# Altium footprint library Package_BGA.PcbLib: 230 footprints (part 12 of 28)
Each footprint in its own frame and in the unit in brackets; x right, y up, seen from the top. Pads: shape width x height; smd on the part's side, far side on the other; paste and mask are expansions set on the pad; w line width, h text height; cw(c..) or ccw(c..) is an arc to the next point about the centre after c.
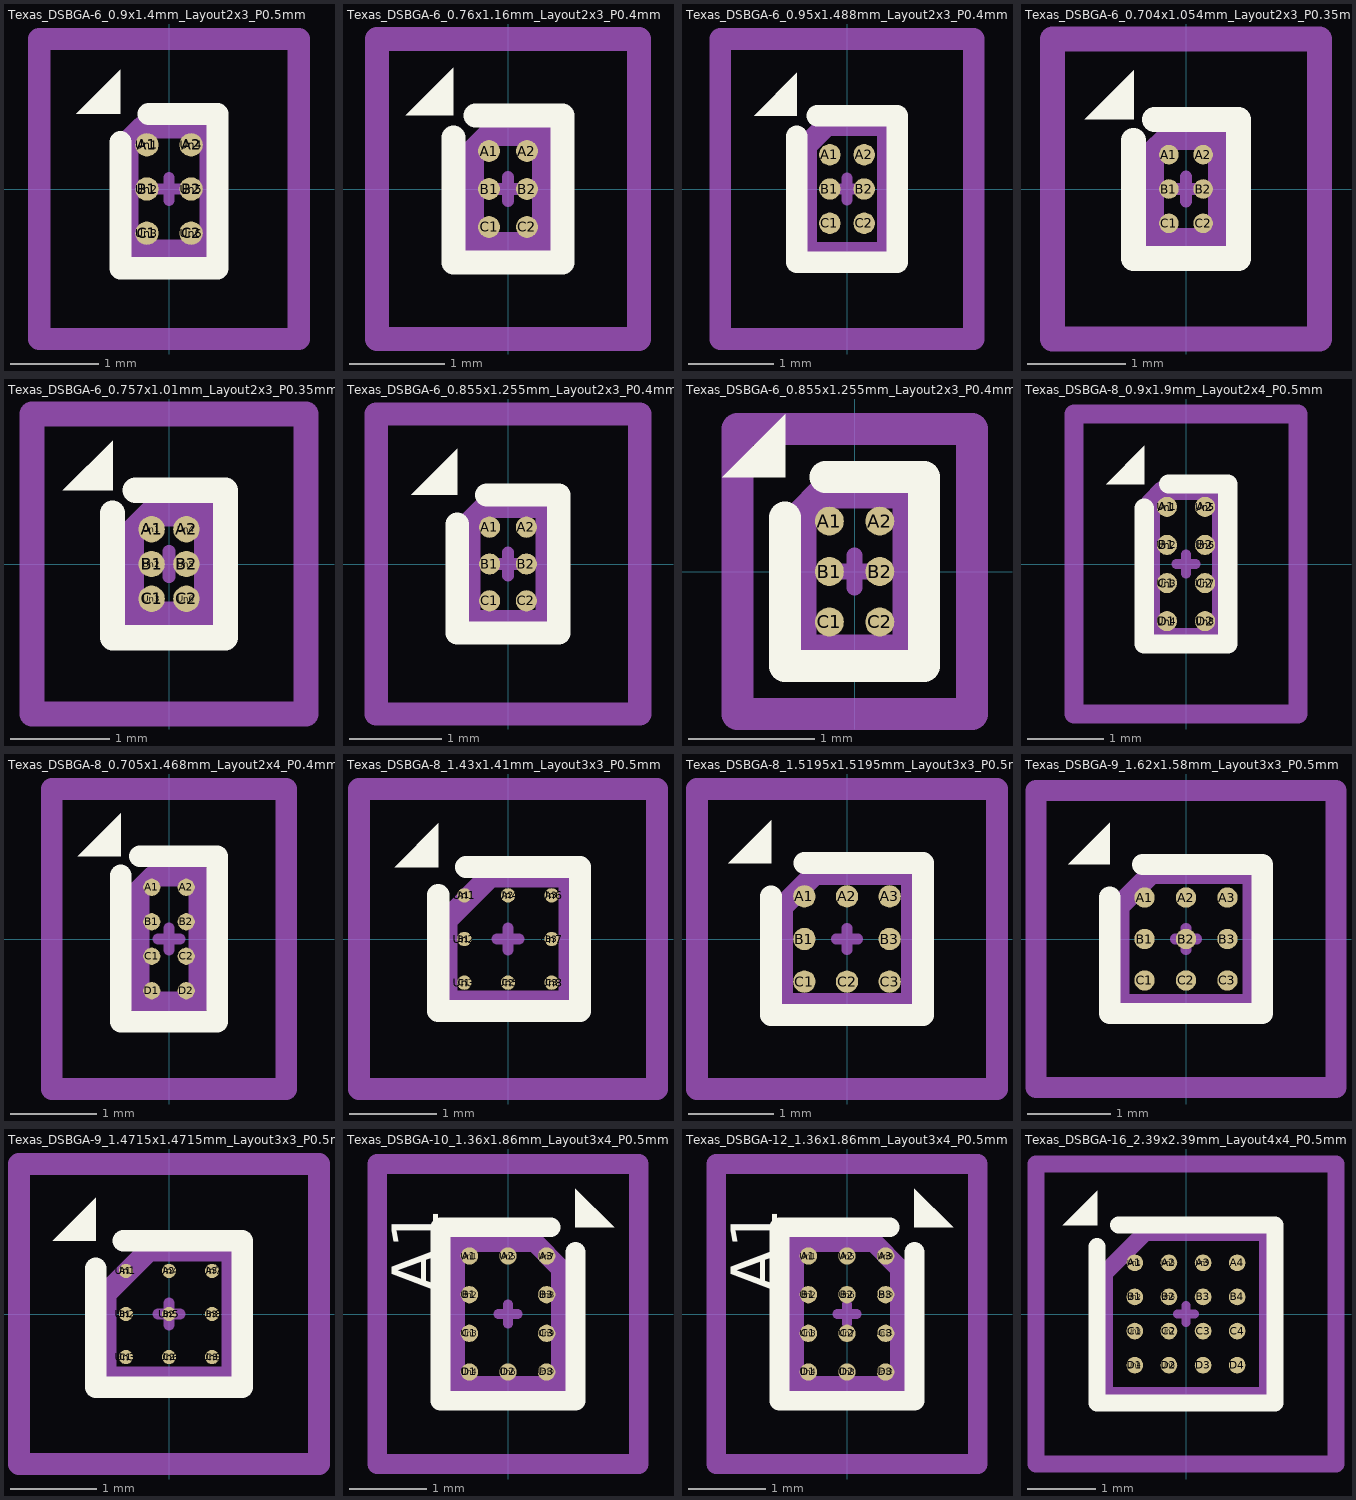
[diagram p11: the footprints below, top view; thin cyan lines are the x and y axes]

## Texas_DSBGA-6_0.9x1.4mm_Layout2x3_P0.5mm [mm] "Texas_DSBGA-6_0.9x1.4mm_Layout2x3_P0.5mm"
pads (12):
  round 0.265 smd: A1(-0.25,0.5) A2(0.25,0.5) B1(-0.25,0) B2(0.25,0) C1(-0.25,-0.5) C2(0.25,-0.5)
  rect 0.3x0.3 on Top Paste: Un1(-0.25,0.5) Un2(-0.25,0) Un3(-0.25,-0.5) Un4(0.25,0.5) Un5(0.25,0) Un6(0.25,-0.5)
F.SilkS:
  region: -0.55,0.85 -1.05,0.85 -0.55,1.35
  lines w0.254: -0.55,0.53 -0.55,-0.9 0.55,-0.9 0.55,0.85 -0.23,0.85
Top Component Center:
  lines w0.127: -0.127,0 0.127,0 -0.127,0 ; 0,-0.127 0,0.127 0,-0.127
Top Assembly:
  lines w0.254: -0.47,-0.7 -0.47,0.53 -0.3,0.7 0.47,0.7 0.47,-0.7 -0.47,-0.7
Top Courtyard:
  lines w0.254: -1.47,-1.7 -1.47,1.7 1.47,1.7 1.47,-1.7 -1.47,-1.7
Top Designator:
  text ".Designator" at -2.253,-0.226 h1

## Texas_DSBGA-6_0.76x1.16mm_Layout2x3_P0.4mm [mm] "Texas_DSBGA-6_0.76x1.16mm_Layout2x3_P0.4mm"
pads (6):
  round 0.23 smd: A1(-0.2,0.4) A2(0.2,0.4) B1(-0.2,0) B2(0.2,0) C1(-0.2,-0.4) C2(0.2,-0.4)
F.SilkS:
  region: -0.575,0.775 -1.075,0.775 -0.575,1.275
  lines w0.254: -0.575,0.543 -0.575,-0.775 0.575,-0.775 0.575,0.775 -0.343,0.775
Top Component Center:
  lines w0.127: -0.127,0 0.127,0 -0.127,0 ; 0,-0.127 0,0.127 0,-0.127
Top Assembly:
  lines w0.254: -0.38,-0.58 0.38,-0.58 0.38,0.58 -0.19,0.58 -0.38,0.39 -0.38,-0.58
Top Courtyard:
  lines w0.254: -1.38,-1.58 1.38,-1.58 1.38,1.58 -1.38,1.58 -1.38,-1.58
Top Designator:
  text ".Designator" at -2.253,-0.226 h1

## Texas_DSBGA-6_0.95x1.488mm_Layout2x3_P0.4mm [mm] "Texas_DSBGA-6_0.95x1.488mm_Layout2x3_P0.4mm"
pads (6):
  round 0.25 smd: A1(-0.2,0.4) A2(0.2,0.4) B1(-0.2,0) B2(0.2,0) C1(-0.2,-0.4) C2(0.2,-0.4)
F.SilkS:
  region: -0.585,0.854 -1.085,0.854 -0.585,1.354
  lines w0.254: -0.585,0.617 -0.585,-0.854 0.585,-0.854 0.585,0.854 -0.347,0.854
Top Component Center:
  lines w0.127: -0.127,0 0.127,0 -0.127,0 ; 0,-0.127 0,0.127 0,-0.127
Top Assembly:
  lines w0.254: -0.475,-0.744 -0.475,0.506 -0.238,0.744 0.475,0.744 0.475,-0.744 -0.475,-0.744
Top Courtyard:
  lines w0.254: -1.48,-1.75 -1.48,1.75 1.48,1.75 1.48,-1.75 -1.48,-1.75
Top Designator:
  text ".Designator" at -2.253,-0.226 h1

## Texas_DSBGA-6_0.704x1.054mm_Layout2x3_P0.35mm [mm] "Texas_DSBGA-6_0.704x1.054mm_Layout2x3_P0.35mm"
pads (6):
  round 0.2 smd: A1(-0.175,0.35) A2(0.175,0.35) B1(-0.175,0) B2(0.175,0) C1(-0.175,-0.35) C2(0.175,-0.35)
F.SilkS:
  region: -0.535,0.71 -1.035,0.71 -0.535,1.21
  lines w0.254: -0.535,0.497 -0.535,-0.71 0.535,-0.71 0.535,0.71 -0.323,0.71
Top Component Center:
  lines w0.127: -0.127,0 0.127,0 -0.127,0 ; 0,-0.127 0,0.127 0,-0.127
Top Assembly:
  lines w0.254: -0.352,-0.527 0.352,-0.527 0.352,0.527 -0.176,0.527 -0.352,0.351 -0.352,-0.527
Top Courtyard:
  lines w0.254: -1.36,-1.53 1.36,-1.53 1.36,1.53 -1.36,1.53 -1.36,-1.53
Top Designator:
  text ".Designator" at -2.253,-0.226 h1

## Texas_DSBGA-6_0.757x1.01mm_Layout2x3_P0.35mm [mm] "Texas_DSBGA-6_0.757x1.01mm_Layout2x3_P0.35mm"
pads (12):
  round 0.265 smd: A1(-0.175,0.35) A2(0.175,0.35) B1(-0.175,0) B2(0.175,0) C1(-0.175,-0.35) C2(0.175,-0.35)
  rrect18% 0.21x0.21 on Top Paste: Un1(-0.175,0.35) Un2(-0.175,0) Un3(-0.175,-0.35) Un4(0.175,0.35) Un5(0.175,0) Un6(0.175,-0.35)
F.SilkS:
  region: -0.567,0.743 -1.068,0.743 -0.567,1.242
  lines w0.254: -0.567,0.514 -0.567,-0.743 0.567,-0.743 0.567,0.743 -0.339,0.743
Top Component Center:
  lines w0.127: -0.127,0 0.127,0 -0.127,0 ; 0,-0.127 0,0.127 0,-0.127
Top Assembly:
  lines w0.254: -0.379,-0.505 -0.379,0.316 -0.189,0.505 0.379,0.505 0.379,-0.505 -0.379,-0.505
Top Courtyard:
  lines w0.254: -1.38,-1.51 -1.38,1.51 1.38,1.51 1.38,-1.51 -1.38,-1.51
Top Designator:
  text ".Designator" at -2.253,-0.226 h1
3D body "Texas_DSBGA-6_0.757x1.01mm_Layout2x3_P0.35mm.step": height 0.38, standoff -0.01, extent -0.379,-0.505 0.379,0.505
3D body "Texas_DSBGA-6_0.757x1.01mm_Layout2x3_P0.35mm.step": height 0.38, standoff -0.01, extent -0.379,-0.505 0.379,0.505

## Texas_DSBGA-6_0.855x1.255mm_Layout2x3_P0.4mm_LevelB [mm] "Texas_DSBGA-6_0.855x1.255mm_Layout2x3_P0.4mm_LevelB"
pads (6):
  round 0.23 smd: A1(-0.2,0.4) A2(0.2,0.4) B1(-0.2,0) B2(0.2,0) C1(-0.2,-0.4) C2(0.2,-0.4)
F.SilkS:
  region: -0.55,0.75 -1.05,0.75 -0.55,1.25
  lines w0.254: -0.55,0.43 -0.55,-0.75 0.55,-0.75 0.55,0.75 -0.23,0.75
F.Paste:
  lines w0.254: -0.275,-0.475 -0.125,-0.475 -0.125,-0.325 -0.275,-0.325 -0.275,-0.475 ; -0.275,-0.075 -0.125,-0.075 -0.125,0.075 -0.275,0.075 -0.275,-0.075 ; -0.275,0.325 -0.125,0.325 -0.125,0.475 -0.275,0.475 -0.275,0.325 ; 0.125,-0.475 0.275,-0.475 0.275,-0.325 0.125,-0.325 0.125,-0.475 ; 0.125,-0.075 0.275,-0.075 0.275,0.075 0.125,0.075 0.125,-0.075 ; 0.125,0.325 0.275,0.325 0.275,0.475 0.125,0.475 0.125,0.325
Top Component Center:
  lines w0.127: -0.127,0 0.127,0 -0.127,0 ; 0,-0.127 0,0.127 0,-0.127
Top Assembly:
  lines w0.254: -0.427,-0.627 0.427,-0.627 0.427,0.627 -0.238,0.627 -0.427,0.437 -0.427,-0.627
Top Courtyard:
  lines w0.254: -1.43,-1.63 1.43,-1.63 1.43,1.63 -1.43,1.63 -1.43,-1.63
Top Designator:
  text ".Designator" at -2.253,-0.226 h1

## Texas_DSBGA-6_0.855x1.255mm_Layout2x3_P0.4mm_LevelC [mm] "Texas_DSBGA-6_0.855x1.255mm_Layout2x3_P0.4mm_LevelC"
pads (6):
  round 0.23 smd: A1(-0.2,0.4) A2(0.2,0.4) B1(-0.2,0) B2(0.2,0) C1(-0.2,-0.4) C2(0.2,-0.4)
F.SilkS:
  region: -0.55,0.75 -1.05,0.75 -0.55,1.25
  lines w0.254: -0.55,0.43 -0.55,-0.75 0.55,-0.75 0.55,0.75 -0.23,0.75
F.Paste:
  lines w0.254: -0.275,-0.475 -0.125,-0.475 -0.125,-0.325 -0.275,-0.325 -0.275,-0.475 ; -0.275,-0.075 -0.125,-0.075 -0.125,0.075 -0.275,0.075 -0.275,-0.075 ; -0.275,0.325 -0.125,0.325 -0.125,0.475 -0.275,0.475 -0.275,0.325 ; 0.125,-0.475 0.275,-0.475 0.275,-0.325 0.125,-0.325 0.125,-0.475 ; 0.125,-0.075 0.275,-0.075 0.275,0.075 0.125,0.075 0.125,-0.075 ; 0.125,0.325 0.275,0.325 0.275,0.475 0.125,0.475 0.125,0.325
Top Component Center:
  lines w0.127: -0.127,0 0.127,0 -0.127,0 ; 0,-0.127 0,0.127 0,-0.127
Top Assembly:
  lines w0.254: -0.427,-0.627 0.427,-0.627 0.427,0.627 -0.238,0.627 -0.427,0.437 -0.427,-0.627
Top Courtyard:
  lines w0.254: -0.93,-1.13 0.93,-1.13 0.93,1.13 -0.93,1.13 -0.93,-1.13
Top Designator:
  text ".Designator" at -1.69,-0.171 h0.75

## Texas_DSBGA-8_0.9x1.9mm_Layout2x4_P0.5mm [mm] "Texas_DSBGA-8_0.9x1.9mm_Layout2x4_P0.5mm"
pads (16):
  round 0.265 smd: A1(-0.25,0.75) A2(0.25,0.75) B1(-0.25,0.25) B2(0.25,0.25) C1(-0.25,-0.25) C2(0.25,-0.25) D1(-0.25,-0.75) D2(0.25,-0.75)
  rect 0.3x0.3 on Top Paste: Un1(-0.25,0.75) Un2(-0.25,0.25) Un3(-0.25,-0.25) Un4(-0.25,-0.75) Un5(0.25,0.75) Un6(0.25,0.25) Un7(0.25,-0.25) Un8(0.25,-0.75)
F.SilkS:
  region: -0.55,1.05 -1.05,1.05 -0.55,1.55
  lines w0.254: -0.55,0.73 -0.55,-1.05 0.55,-1.05 0.55,1.05 -0.23,1.05
Top Component Center:
  lines w0.127: -0.127,0 0.127,0 -0.127,0 ; 0,-0.127 0,0.127 0,-0.127
Top Assembly:
  lines w0.254: -0.47,-0.97 -0.47,0.8 -0.3,0.97 0.47,0.97 0.47,-0.97 -0.47,-0.97
Top Courtyard:
  lines w0.254: -1.47,-1.97 -1.47,1.97 1.47,1.97 1.47,-1.97 -1.47,-1.97
Top Designator:
  text ".Designator" at -2.253,-0.226 h1
3D body "Texas_DSBGA-8_0.9x1.9mm_Layout2x4_P0.5mm.step": height 0.5, standoff -0.01, extent -0.45,-0.95 0.45,0.95
3D body "Texas_DSBGA-8_0.9x1.9mm_Layout2x4_P0.5mm.step": height 0.5, standoff -0.01, extent -0.45,-0.95 0.45,0.95

## Texas_DSBGA-8_0.705x1.468mm_Layout2x4_P0.4mm [mm] "Texas_DSBGA-8_0.705x1.468mm_Layout2x4_P0.4mm"
pads (8):
  round 0.2 smd: A1(-0.2,0.6) A2(0.2,0.6) B1(-0.2,0.2) B2(0.2,0.2) C1(-0.2,-0.2) C2(0.2,-0.2) D1(-0.2,-0.6) D2(0.2,-0.6)
F.SilkS:
  region: -0.56,0.96 -1.06,0.96 -0.56,1.46
  lines w0.254: -0.56,0.735 -0.56,-0.96 0.56,-0.96 0.56,0.96 -0.335,0.96
Top Component Center:
  lines w0.127: -0.127,0 0.127,0 -0.127,0 ; 0,-0.127 0,0.127 0,-0.127
Top Assembly:
  lines w0.254: -0.353,-0.734 -0.353,0.558 -0.176,0.734 0.353,0.734 0.353,-0.734 -0.353,-0.734
Top Courtyard:
  lines w0.254: -1.36,-1.74 -1.36,1.74 1.36,1.74 1.36,-1.74 -1.36,-1.74
Top Designator:
  text ".Designator" at -2.253,-0.226 h1
3D body "Texas_DSBGA-8_0.705x1.468mm_Layout2x4_P0.4mm.step": height 0.38, standoff -0.03, extent -0.353,-0.734 0.353,0.734
3D body "Texas_DSBGA-8_0.705x1.468mm_Layout2x4_P0.4mm.step": height 0.38, standoff -0.03, extent -0.353,-0.734 0.353,0.734

## Texas_DSBGA-8_1.43x1.41mm_Layout3x3_P0.5mm [mm] "Texas_DSBGA-8_1.43x1.41mm_Layout3x3_P0.5mm"
pads (16):
  round 0.165 smd: A1(-0.5,0.5) A2(0,0.5) A3(0.5,0.5) B1(-0.5,0) B3(0.5,0) C1(-0.5,-0.5) C2(0,-0.5) C3(0.5,-0.5)
  rect 0.3x0.3 on Top Paste: Un1(-0.5,0.5) Un2(-0.5,0) Un3(-0.5,-0.5) Un4(0,0.5) Un5(0,-0.5) Un6(0.5,0.5) Un7(0.5,0) Un8(0.5,-0.5)
F.SilkS:
  region: -0.8,0.825 -1.3,0.825 -0.8,1.325
  lines w0.254: -0.8,-0.825 0.815,-0.825 ; -0.8,-0.8 -0.8,0.505 ; -0.48,0.825 0.815,0.825 ; 0.825,-0.825 0.825,0.825
Top Component Center:
  lines w0.127: -0.127,0 0.127,0 -0.127,0 ; 0,-0.127 0,0.127 0,-0.127
Top Assembly:
  lines w0.254: -0.705,-0.715 0.705,-0.715 0.705,0.715 -0.205,0.715 -0.705,0.215 -0.705,-0.715
Top Courtyard:
  lines w0.254: -1.71,-1.72 1.71,-1.72 1.71,1.72 -1.71,1.72 -1.71,-1.72
Top Designator:
  text ".Designator" at -2.253,-0.226 h1

## Texas_DSBGA-8_1.5195x1.5195mm_Layout3x3_P0.5mm [mm] "Texas_DSBGA-8_1.5195x1.5195mm_Layout3x3_P0.5mm"
pads (8):
  round 0.262 smd: A1(-0.5,0.5) A2(0,0.5) A3(0.5,0.5) B1(-0.5,0) B3(0.5,0) C1(-0.5,-0.5) C2(0,-0.5) C3(0.5,-0.5)
F.SilkS:
  region: -0.891,0.891 -1.391,0.891 -0.891,1.391
  lines w0.254: -0.891,0.501 -0.891,-0.891 0.891,-0.891 0.891,0.891 -0.501,0.891
Top Component Center:
  lines w0.127: -0.127,0 0.127,0 -0.127,0 ; 0,-0.127 0,0.127 0,-0.127
Top Assembly:
  lines w0.254: -0.76,-0.76 -0.76,0.38 -0.38,0.76 0.76,0.76 0.76,-0.76 -0.76,-0.76
Top Courtyard:
  lines w0.254: -1.76,-1.76 -1.76,1.76 1.76,1.76 1.76,-1.76 -1.76,-1.76
Top Designator:
  text ".Designator" at -3.432,-0.345 h1.52

## Texas_DSBGA-9_1.62x1.58mm_Layout3x3_P0.5mm [mm] "Texas_DSBGA-9_1.62x1.58mm_Layout3x3_P0.5mm"
pads (9):
  round 0.245 smd: A1(-0.5,0.5) A2(0,0.5) A3(0.5,0.5) B1(-0.5,0) B2(0,0) B3(0.5,0) C1(-0.5,-0.5) C2(0,-0.5) C3(0.5,-0.5)
F.SilkS:
  region: -0.92,0.9 -1.42,0.9 -0.92,1.4
  lines w0.254: -0.92,0.505 -0.92,-0.9 0.92,-0.9 0.92,0.9 -0.525,0.9
Top Component Center:
  lines w0.127: -0.127,0 0.127,0 -0.127,0 ; 0,-0.127 0,0.127 0,-0.127
Top Assembly:
  lines w0.254: -0.81,-0.79 0.81,-0.79 0.81,0.79 -0.415,0.79 -0.81,0.395 -0.81,-0.79
Top Courtyard:
  lines w0.254: -1.81,-1.79 1.81,-1.79 1.81,1.79 -1.81,1.79 -1.81,-1.79
Top Designator:
  text ".Designator" at -2.253,-0.226 h1

## Texas_DSBGA-9_1.4715x1.4715mm_Layout3x3_P0.5mm [mm] "Texas_DSBGA-9_1.4715x1.4715mm_Layout3x3_P0.5mm"
pads (18):
  round 0.165 smd: A1(-0.5,0.5) A2(0,0.5) A3(0.5,0.5) B1(-0.5,0) B2(0,0) B3(0.5,0) C1(-0.5,-0.5) C2(0,-0.5) C3(0.5,-0.5)
  rect 0.3x0.3 on Top Paste: Un1(-0.5,0.5) Un2(-0.5,0) Un3(-0.5,-0.5) Un4(0,0.5) Un5(0,0) Un6(0,-0.5) Un7(0.5,0.5) Un8(0.5,0) Un9(0.5,-0.5)
F.SilkS:
  region: -0.85,0.85 -1.35,0.85 -0.85,1.35
  lines w0.254: -0.85,0.53 -0.85,-0.85 0.85,-0.85 0.85,0.85 -0.53,0.85
Top Component Center:
  lines w0.127: -0.127,0 0.127,0 -0.127,0 ; 0,-0.127 0,0.127 0,-0.127
Top Assembly:
  lines w0.254: -0.736,-0.736 -0.736,0.236 -0.236,0.736 0.736,0.736 0.736,-0.736 -0.736,-0.736
Top Courtyard:
  lines w0.254: -1.74,-1.74 -1.74,1.74 1.74,1.74 1.74,-1.74 -1.74,-1.74
Top Designator:
  text ".Designator" at -2.253,-0.226 h1

## Texas_DSBGA-10_1.36x1.86mm_Layout3x4_P0.5mm [mm] "v"
pads (20):
  round 0.225 smd: A1(-0.5,0.75) A2(0,0.75) A3(0.5,0.75) B1(-0.5,0.25) B3(0.5,0.25) C1(-0.5,-0.25) C3(0.5,-0.25) D1(-0.5,-0.75) D2(0,-0.75) D3(0.5,-0.75)
  rrect20% 0.25x0.25 on Top Paste: Un1(-0.5,0.75) Un2(-0.5,0.25) Un3(-0.5,-0.25) Un4(-0.5,-0.75) Un5(0,0.75) Un6(0,-0.75) Un7(0.5,0.75) Un8(0.5,0.25) Un9(0.5,-0.25) Un10(0.5,-0.75)
F.SilkS:
  region: 1.372,1.122 0.873,1.122 0.873,1.623
  lines w0.254: 0.553,1.122 -0.873,1.122 -0.873,-1.122 0.873,-1.122 0.873,0.803
  text "A1" at -0.9,0.28 h0.6
Top Component Center:
  lines w0.127: -0.127,0 0.127,0 -0.127,0 ; 0,-0.127 0,0.127 0,-0.127
Top Assembly:
  lines w0.254: -0.68,-0.93 -0.68,0.93 0.34,0.93 0.68,0.59 0.68,-0.93 -0.68,-0.93
Top Courtyard:
  lines w0.254: -1.69,-1.94 -1.69,1.94 1.69,1.94 1.69,-1.94 -1.69,-1.94
Top Designator:
  text ".Designator" at -2.253,-0.226 h1
3D body "Texas_DSBGA-10_1.36x1.86mm_Layout3x4_P0.5mm.step": height 0.63, standoff -0.01, extent -0.68,-0.93 0.68,0.93
3D body "Texas_DSBGA-10_1.36x1.86mm_Layout3x4_P0.5mm.step": height 0.63, standoff -0.01, extent -0.68,-0.93 0.68,0.93

## Texas_DSBGA-12_1.36x1.86mm_Layout3x4_P0.5mm [mm] "Texas_DSBGA-12_1.36x1.86mm_Layout3x4_P0.5mm"
pads (24):
  round 0.225 smd: A1(-0.5,0.75) A2(0,0.75) A3(0.5,0.75) B1(-0.5,0.25) B2(0,0.25) B3(0.5,0.25) C1(-0.5,-0.25) C2(0,-0.25) C3(0.5,-0.25) D1(-0.5,-0.75) D2(0,-0.75) D3(0.5,-0.75)
  rrect20% 0.25x0.25 on Top Paste: Un1(-0.5,0.75) Un2(-0.5,0.25) Un3(-0.5,-0.25) Un4(-0.5,-0.75) Un5(0,0.75) Un6(0,0.25) Un7(0,-0.25) Un8(0,-0.75) Un9(0.5,0.75) Un10(0.5,0.25) Un11(0.5,-0.25) Un12(0.5,-0.75)
F.SilkS:
  region: 1.372,1.122 0.873,1.122 0.873,1.623
  lines w0.254: 0.553,1.122 -0.873,1.122 -0.873,-1.122 0.873,-1.122 0.873,0.803
  text "A1" at -0.9,0.28 h0.6
Top Component Center:
  lines w0.127: -0.127,0 0.127,0 -0.127,0 ; 0,-0.127 0,0.127 0,-0.127
Top Assembly:
  lines w0.254: -0.68,-0.93 -0.68,0.93 0.34,0.93 0.68,0.59 0.68,-0.93 -0.68,-0.93
Top Courtyard:
  lines w0.254: -1.69,-1.94 -1.69,1.94 1.69,1.94 1.69,-1.94 -1.69,-1.94
Top Designator:
  text ".Designator" at -2.253,-0.226 h1
3D body "Texas_DSBGA-12_1.36x1.86mm_Layout3x4_P0.5mm.step": height 0.63, standoff -0.01, extent -0.68,-0.93 0.68,0.93
3D body "Texas_DSBGA-12_1.36x1.86mm_Layout3x4_P0.5mm.step": height 0.63, standoff -0.01, extent -0.68,-0.93 0.68,0.93

## Texas_DSBGA-16_2.39x2.39mm_Layout4x4_P0.5mm [mm] "Texas_DSBGA-16_2.39x2.39mm_Layout4x4_P0.5mm"
pads (32):
  round 0.245 smd: A1(-0.75,0.75) A2(-0.25,0.75) A3(0.25,0.75) A4(0.75,0.75) B1(-0.75,0.25) B2(-0.25,0.25) B3(0.25,0.25) B4(0.75,0.25) C1(-0.75,-0.25) C2(-0.25,-0.25) C3(0.25,-0.25) C4(0.75,-0.25) D1(-0.75,-0.75) D2(-0.25,-0.75) D3(0.25,-0.75) D4(0.75,-0.75)
  rrect20% 0.25x0.25 on Top Paste: Un1(-0.75,0.75) Un2(-0.75,0.25) Un3(-0.75,-0.25) Un4(-0.75,-0.75) Un5(-0.25,0.75) Un6(-0.25,0.25) Un7(-0.25,-0.25) Un8(-0.25,-0.75) Un9(0.25,0.75) Un10(0.25,0.25) Un11(0.25,-0.25) Un12(0.25,-0.75) Un13(0.75,0.75) Un14(0.75,0.25) Un15(0.75,-0.25) Un16(0.75,-0.75)
F.SilkS:
  region: -1.305,1.305 -1.805,1.305 -1.305,1.805
  lines w0.254: -1.305,0.985 -1.305,-1.305 1.305,-1.305 1.305,1.305 -0.985,1.305
Top Component Center:
  lines w0.127: -0.127,0 0.127,0 -0.127,0 ; 0,-0.127 0,0.127 0,-0.127
Top Assembly:
  lines w0.254: -1.195,-1.195 -1.195,0.597 -0.597,1.195 1.195,1.195 1.195,-1.195 -1.195,-1.195
Top Courtyard:
  lines w0.254: -2.2,-2.2 -2.2,2.2 2.2,2.2 2.2,-2.2 -2.2,-2.2
Top Designator:
  text ".Designator" at -3.432,-0.345 h1.52